# Altium integrated library TSX-3225_25.0000MF20X-W.IntLib: 1 symbol
Pins are listed as number, name and electrical type; pins without a type are passive.

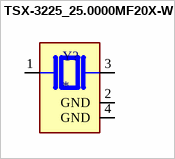
[diagram p0: symbol TSX-3225_25.0000MF20X-W]

## TSX-3225_25.0000MF20X-W
designator Y?
MF: {'manufacturer': u'Epson Timing'}; MP: TSX-3225 25.0000MF20X-W; Package: None; Price: None; Value: *; Availability: Unavailable
footprint XTAL_TSX-3225_25.0000MF20X-W
pins: 1, 2 GND (power), 3 2, 4 GND (power)